# Altium schematic symbol library LMP91000SDX_NOPB.SchLib: 1 symbol
Pins are listed as number, name and electrical type; pins without a type are passive.

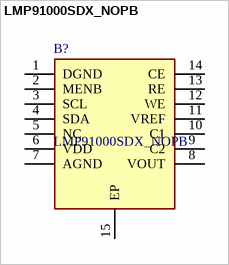
[diagram p0: symbol LMP91000SDX_NOPB]

## LMP91000SDX_NOPB
designator B?
Sensor AFE System Analog Output 3.3V/5V 14-Pin WSON EP T/R; Manufacturer_Name: Texas Instruments; Manufacturer_Part_Number: LMP91000SDX/NOPB; Geometry.Height: 0.8mm; Mouser Part Number: 926-LMP91000SDX/NOPB; Mouser Price/Stock: https://www.mouser.co.uk/ProductDetail/Texas-Instruments/LMP91000SDX-NOPB?qs=7lkVKPoqpbYmeZ1SbPtg0w%3D%3D; Datasheet Link: https://www.arrow.com/en/products/lmp91000sdxnopb/texas-instruments
footprint SON50P400X400X80-15N
pins: 1 DGND, 2 MENB, 3 SCL, 4 SDA, 5 NC, 6 VDD, 7 AGND, 8 VOUT, 9 C2, 10 C1, 11 VREF, 12 WE, 13 RE, 14 CE, 15 EP